# Altium footprint library rus.PcbLib: 72 footprints (part 2 of 5)
Each footprint in its own frame and in the unit in brackets; x right, y up, seen from the top. Pads: shape width x height; smd on the part's side, far side on the other; paste and mask are expansions set on the pad; w line width, h text height; cw(c..) or ccw(c..) is an arc to the next point about the centre after c.
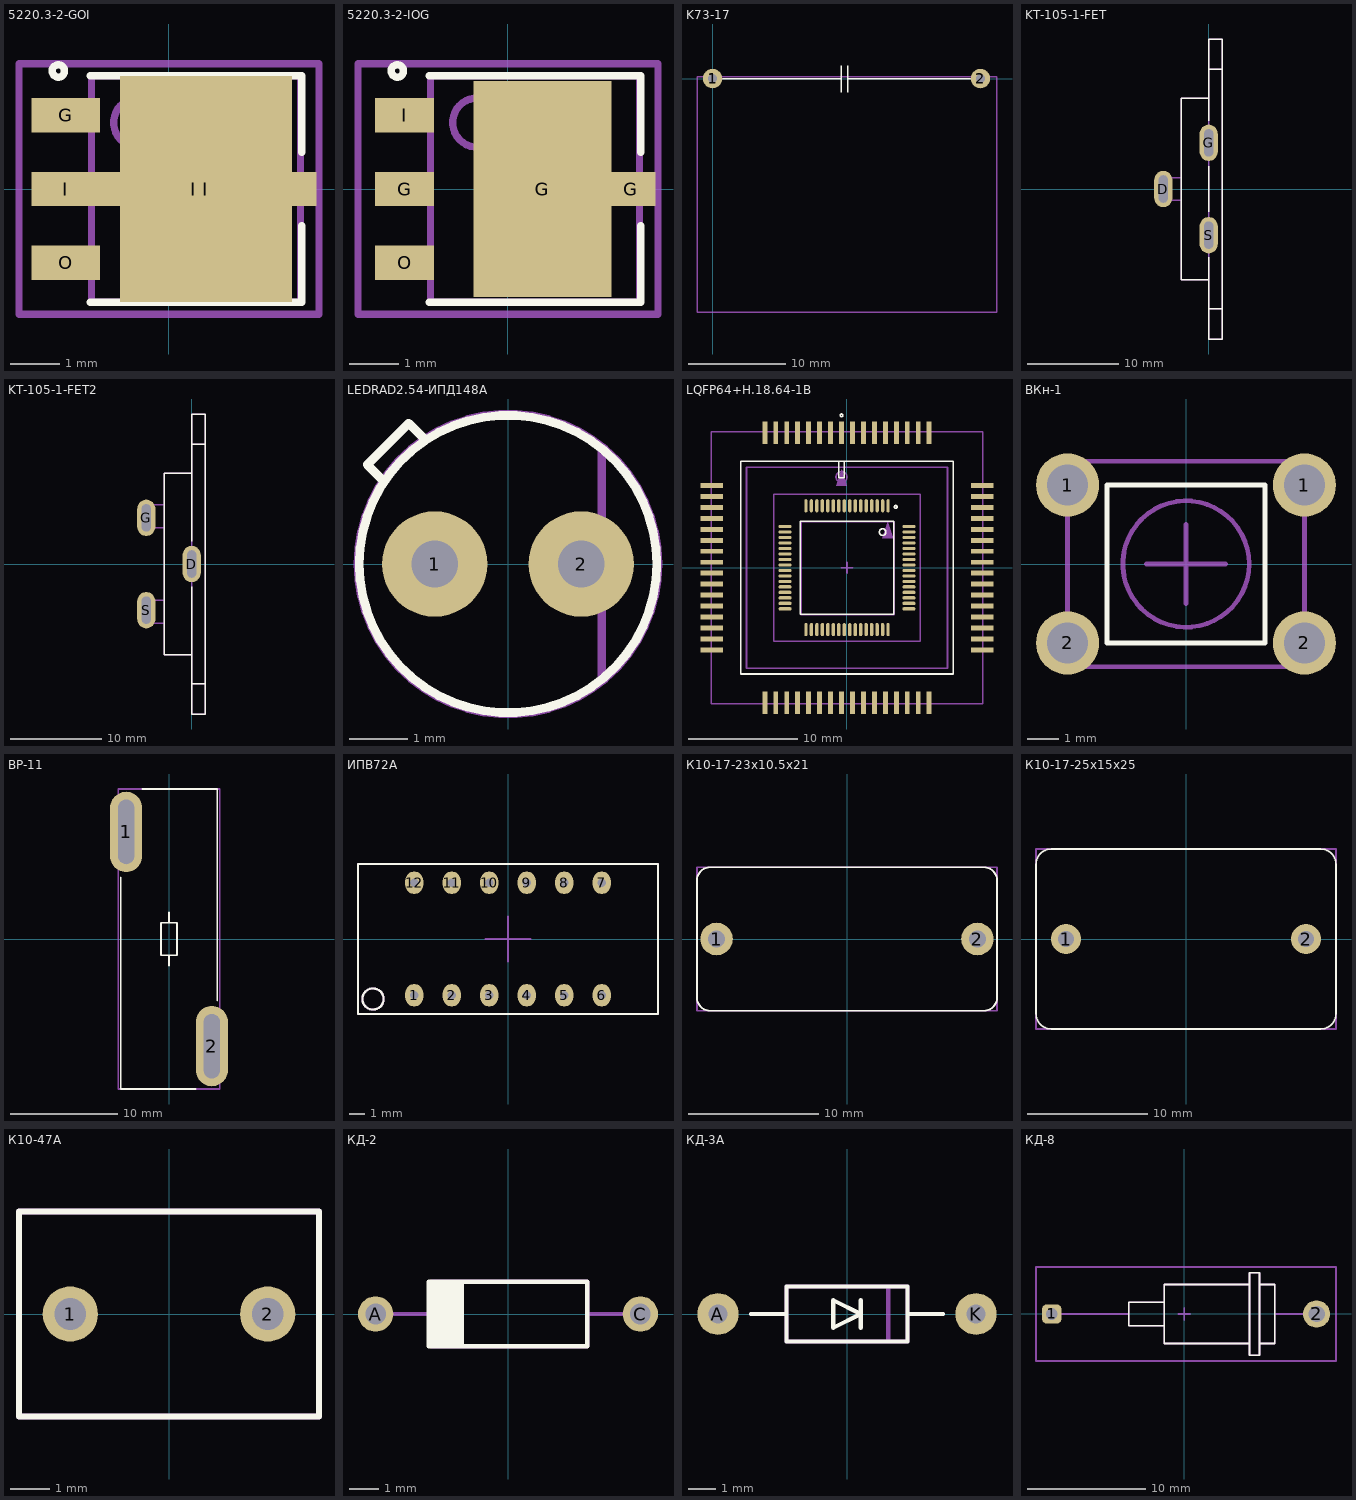
[diagram p1: the footprints below, top view; thin cyan lines are the x and y axes]

## 5220.3-2-GOI [mm] "SOT89, 3-Leads, Body 4,60x4,25mm, Pitch 1,50mm, Lead Span 4,8mm, IPC Medium Density"
height 1.6
pads (5):
  rect 1.4x0.7 smd: G(-2.1,1.5) I(-2.1,0) O(-2.1,-1.5)
  rect 5x0.7 smd: I(0.5,0)
  rect 3.5x4.6 smd: I(0.75,0)
Top Overlay:
  circle w0.15: c-2.25,2.4 r0.125
  lines w0.15: -1.6,-2.3 2.7,-2.3 2.7,-0.75 ; -1.6,2.3 2.7,2.3 2.7,0.75
Mechanical 15:
  lines w0.15: 0.05,0 1.05,0 ; 0.55,-0.5 0.55,0.5 ; -3.05,-2.55 3.05,-2.55 3.05,2.55 -3.05,2.55 -3.05,-2.55
Mechanical 29:
  circle w0.15: c-0.625,1.35 r0.5
  lines w0.15: -1.575,-2.3 2.675,-2.3 2.675,2.3 -1.575,2.3 -1.575,-2.3
  text ".Designator" at -1.4,-0.5 h1
3D body "5220.3-2-IOG.step": height 1.6, standoff 0, extent -2.75,-2.3 2.85,2.3

## 5220.3-2-IOG [mm] "SOT89, 3-Leads, Body 4,60x4,25mm, Pitch 1,50mm, Lead Span 4,8mm, IPC Medium Density"
height 1.6
pads (5):
  rect 1.2x0.7 smd: G(-2.1,0) I(-2.1,1.5) O(-2.1,-1.5)
  rect 2.8x4.4 smd: G(0.7,0)
  rect 1x0.7 smd: G(2.5,0)
Top Overlay:
  circle w0.15: c-2.25,2.4 r0.125
  lines w0.15: -1.6,-2.3 2.7,-2.3 2.7,-0.75 ; -1.6,2.3 2.7,2.3 2.7,0.75
Mechanical 15:
  lines w0.15: 0.05,0 1.05,0 ; 0.55,-0.5 0.55,0.5 ; -3.05,-2.55 3.05,-2.55 3.05,2.55 -3.05,2.55 -3.05,-2.55
Mechanical 29:
  circle w0.15: c-0.625,1.35 r0.5
  lines w0.15: -1.575,-2.3 2.675,-2.3 2.675,2.3 -1.575,2.3 -1.575,-2.3
  text ".Designator" at -1.4,-0.4 h1
3D body "5220.3-2-IOG.step": height 1.6, standoff 0, extent -2.75,-2.3 2.85,2.3

## K73-17 [mm]
pads (2):
  round 2 hole 0.9: 1(0,0) 2(27.5,0)
Top Overlay:
  lines w0.15: 0,0 13.225,0 13.225,-0.037 ; 13.225,-1.4 13.225,1.325 ; 13.875,-1.4 13.875,1.325 ; 13.875,-0.037 13.875,0 27.5,0
Mechanical 29:
  lines w0.15: -1.6,-24 29.2,-24 29.2,0.2 -1.6,0.2 -1.6,-24
  text ".Designator" at 9.1,-12 h1
3D body "K73-17.STEP": height 14.51, standoff -2, extent -1.725,-24.05 29.275,0.35

## KT-105-1-FET [mm]
height 30
pads (3):
  oval 2x4 hole 1 slot 3 at 90 deg: D(-5,0) G(0,5.08) S(0,-5.08)
Top Overlay:
  lines w0.15: 0,-13.2 1.5,-13.2 ; 0,-10 -3,-10 -3,10 0,10 ; 0,-7.5 0,-16.5 1.5,-16.5 1.5,-7.5 1.5,7.5 1.5,11 1.5,16.5 1.35,16.5 0,16.5 0,7.5 ; 0,-2.5 0,2.5 ; 0,13.2 1.5,13.2
Mechanical 29:
  lines w0.15: -3,-1.25 -5,-1.25 -5,1.25 -3,1.25 ; 0,-13.2 1.5,-13.2 ; 0,-10 -3,-10 -3,10 0,10 ; 0,13.2 1.5,13.2 ; 0,-16.5 0,-7.5 0,16.5 1.35,16.5 1.5,16.5 1.5,11 1.5,7.5 1.5,-7.5 1.5,-16.5 0,-16.5
  text ".Designator" at -1.3,-4.2 h1
3D body "KT-105-1-flex.STEP": height 30.8, standoff -3.2, extent -5.3,-16.35 1.2,16.35

## KT-105-1-FET2 [mm]
height 30
pads (3):
  oval 2x4 hole 1 slot 3 at 90 deg: D(0,0) G(-5,5.08) S(-5,-5.08)
Top Overlay:
  lines w0.15: 0,-13.2 1.5,-13.2 ; 0,-10 -3,-10 -3,10 0,10 ; 0,-2.5 0,-16.5 1.5,-16.5 1.5,-7.5 1.5,7.5 1.5,11 1.5,16.5 1.35,16.5 0,16.5 0,2.5 ; 0,13.2 1.5,13.2
Mechanical 29:
  lines w0.15: -3,-6.5 -5,-6.5 -5,-4 -3,-4 ; -3,4 -5,4 -5,6.5 -3,6.5 ; 0,-13.2 1.5,-13.2 ; 0,-10 -3,-10 -3,10 0,10 ; 0,13.2 1.5,13.2 ; 0,-16.5 0,-7.5 0,16.5 1.35,16.5 1.5,16.5 1.5,11 1.5,7.5 1.5,-7.5 1.5,-16.5 0,-16.5
  text ".Designator" at -1.2,-3.6 h1
3D body "KT-105-1-flex2.STEP": height 30.8, standoff -3.2, extent -5.3,-16.35 1.2,16.35

## LEDRAD2.54-ИПД148А [mm]
height 10
pads (2):
  round 1.8 hole 0.8: 1(-1.252,0) 2(1.252,0)
Top Overlay:
  circle w0.15: c0,0 r2.54
  lines w0.15: -2.121,1.414 -2.404,1.697 -1.697,2.404 -1.414,2.121
Mechanical 29:
  circle w0.15: c0,0 r2.561
  lines w0.15: 1.6,-2 1.6,2
  text ".Designator" at -2.2,-0.4 h1
3D body "ИПД148Аподставка.STEP": height 4.5, standoff 0, extent -3,-3 3,3
3D body "ИПД148А.STEP": height 9.19, standoff -2.5, extent -2.92,-2.92 2.92,2.933

## LQFP64+Н.18.64-1В [mm] "CQFP, 64-Leads, Body 23,40x23,40mm, Pitch 1,00mm, IPC Medium Density"
height 3.5
pads (128):
  oval 0.3x1.2 smd: 1(3.75,5.65) 2(3.25,5.65) 3(2.75,5.65) 4(2.25,5.65) 5(1.75,5.65) 6(1.25,5.65) 7(0.75,5.65) 8(0.25,5.65) 9(-0.25,5.65) 10(-0.75,5.65) 11(-1.25,5.65) 12(-1.75,5.65) 13(-2.25,5.65) 14(-2.75,5.65) 15(-3.25,5.65) 16(-3.75,5.65) 33(-3.75,-5.65) 34(-3.25,-5.65) 35(-2.75,-5.65) 36(-2.25,-5.65) 37(-1.75,-5.65) 38(-1.25,-5.65) 39(-0.75,-5.65) 40(-0.25,-5.65) 41(0.25,-5.65) 42(0.75,-5.65) 43(1.25,-5.65) 44(1.75,-5.65) 45(2.25,-5.65) 46(2.75,-5.65) 47(3.25,-5.65) 48(3.75,-5.65)
  rect 0.45x2.05 smd: 1(7.5,12.325) 2(6.5,12.325) 3(5.5,12.325) 4(4.5,12.325) 5(3.5,12.325) 6(2.5,12.325) 7(1.5,12.325) 8(0.5,12.325) 9(-0.5,12.325) 10(-1.5,12.325) 11(-2.5,12.325) 12(-3.5,12.325) 13(-4.5,12.325) 14(-5.5,12.325) 15(-6.5,12.325) 16(-7.5,12.325) 33(-7.5,-12.325) 34(-6.5,-12.325) 35(-5.5,-12.325) 36(-4.5,-12.325) 37(-3.5,-12.325) 38(-2.5,-12.325) 39(-1.5,-12.325) 40(-0.5,-12.325) 41(0.5,-12.325) 42(1.5,-12.325) 43(2.5,-12.325) 44(3.5,-12.325) 45(4.5,-12.325) 46(5.5,-12.325) 47(6.5,-12.325) 48(7.5,-12.325)
  rect 2.05x0.45 smd: 17(-12.325,7.5) 18(-12.325,6.5) 19(-12.325,5.5) 20(-12.325,4.5) 21(-12.325,3.5) 22(-12.325,2.5) 23(-12.325,1.5) 24(-12.325,0.5) 25(-12.325,-0.5) 26(-12.325,-1.5) 27(-12.325,-2.5) 28(-12.325,-3.5) 29(-12.325,-4.5) 30(-12.325,-5.5) 31(-12.325,-6.5) 32(-12.325,-7.5) 49(12.325,-7.5) 50(12.325,-6.5) 51(12.325,-5.5) 52(12.325,-4.5) 53(12.325,-3.5) 54(12.325,-2.5) 55(12.325,-1.5) 56(12.325,-0.5) 57(12.325,0.5) 58(12.325,1.5) 59(12.325,2.5) 60(12.325,3.5) 61(12.325,4.5) 62(12.325,5.5) 63(12.325,6.5) 64(12.325,7.5)
  oval 1.2x0.3 smd: 17(-5.65,3.75) 18(-5.65,3.25) 19(-5.65,2.75) 20(-5.65,2.25) 21(-5.65,1.75) 22(-5.65,1.25) 23(-5.65,0.75) 24(-5.65,0.25) 25(-5.65,-0.25) 26(-5.65,-0.75) 27(-5.65,-1.25) 28(-5.65,-1.75) 29(-5.65,-2.25) 30(-5.65,-2.75) 31(-5.65,-3.25) 32(-5.65,-3.75) 49(5.65,-3.75) 50(5.65,-3.25) 51(5.65,-2.75) 52(5.65,-2.25) 53(5.65,-1.75) 54(5.65,-1.25) 55(5.65,-0.75) 56(5.65,-0.25) 57(5.65,0.25) 58(5.65,0.75) 59(5.65,1.25) 60(5.65,1.75) 61(5.65,2.25) 62(5.65,2.75) 63(5.65,3.25) 64(5.65,3.75)
Top Overlay:
  circle w0.15: c4.45,5.55 r0.125
  circle w0.15: c3.25,3.25 r0.3
  circle w0.15: c-0.5,13.9 r0.125
  lines w0.15: -0.75,9.7 -0.75,8.2 -0.25,8.2 -0.25,9.7 ; -9.7,-9.7 -9.7,9.7 9.7,9.7 9.7,-9.7 -9.7,-9.7 ; -4.25,-4.25 4.25,-4.25 4.25,4.25 -4.25,4.25 -4.25,-4.25
Mechanical 13:
  circle w0.15: c-0.5,8.275 r0.5
Mechanical 15:
  lines w0.15: -12.4,-12.4 -12.4,12.4 12.4,12.4 12.4,-12.4 -12.4,-12.4 ; -6.7,-6.7 6.7,-6.7 6.7,6.7 -6.7,6.7 -6.7,-6.7 ; -0.5,0 0.5,0 -0.5,0 ; 0,-0.5 0,0.5 0,-0.5
Mechanical 29:
  region: -0.5,9 0,7.5 -1,7.5
  region: 3.7,4.2 4.2,2.7 3.2,2.7
  lines w0.15: -9.175,-9.175 -9.175,9.175 9.175,9.175 9.175,-9.175 -9.175,-9.175 ; -4.2,-4.3 4.3,-4.3 4.3,4.2 -4.2,4.2 -4.2,-4.3
  text ".Designator" at -3.1,-0.6 h1
3D body "Н.18.64-1В.STEP": height 4.11, standoff 0, extent -13.15,-13.15 13.15,13.15
3D body: height 1.5, standoff 0, extent -6,-6 6,6

## ВКн-1 [mm]
height 7
pads (4):
  round 2 hole 1.3: 1(-3.75,2.5) 1(3.75,2.5) 2(-3.75,-2.5) 2(3.75,-2.5)
Top Overlay:
  lines w0.15: -2.5,-2.5 2.5,-2.5 2.5,2.5 -2.5,2.5 -2.5,-2.5
Mechanical 15:
  lines w0.15: -1.25,0 1.25,0 ; 0,-1.25 0,1.25
Mechanical 29:
  circle w0.15: c0,0 r2
  lines w0.15: -3.75,-3.25 3.75,-3.25 3.75,3.25 -3.75,3.25 -3.75,-3.25
  text ".Designator" at -2.9,3.5 h1
3D body "ВКн-1.STEP": height 5.7, standoff -2.5, extent -3.75,-3.25 3.75,3.25

## ВР-11 [mm]
height 28
pads (2):
  oval 3x7.5 hole 1.5 slot 6 at 90 deg unplated: 1(-4,10) 2(4,-10)
Top Overlay:
  lines w0.15: -4.5,5.75 -4.5,-14 2.5,-14 ; -2.5,14 4.5,14 4.5,-5.75 ; 0,-2.5 0,-1.5 ; 0,1.5 0,2.5 ; -0.75,-1.5 -0.75,1.5 0.75,1.5 0.75,-1.5 -0.75,-1.5
Mechanical 29:
  lines w0.15: -4.75,-14 4.75,-14 4.75,14 -4.75,14 -4.75,-14
  text ".Designator" at -3.2,-0.3 h1
3D body "ВР-11.STEP": height 28.5, standoff -4.5, extent -4.65,-14 4.65,14

## ИПВ72А [mm]
height 8
pads (12):
  oval 1.2x1.5 hole 0.6: 1(-6.25,-3.75) 2(-3.75,-3.75) 3(-1.25,-3.75) 4(1.25,-3.75) 5(3.75,-3.75) 6(6.25,-3.75) 7(6.25,3.75) 8(3.75,3.75) 9(1.25,3.75) 10(-1.25,3.75) 11(-3.75,3.75) 12(-6.25,3.75)
Top Overlay:
  circle w0.15: c-9,-4 r0.707
  lines w0.15: -10,-5 10,-5 10,5 -10,5 -10,-5
Mechanical 15:
  lines w0.15: -1.5,0 1.5,0 ; 0,-1.5 0,1.5
Mechanical 29:
  circle w0.15: c-9,-4 r0.707
  lines w0.15: -10,-5 10,-5 10,5 -10,5 -10,-5
  text ".Designator" at -3.8,-0.3 h1
3D body "ИПВ72А.STEP": height 6, standoff -4.5, extent -10,-5 10,5

## К10-17-23х10.5х21 [mm]
height 23
pads (2):
  round 2.5 hole 1.3 unplated: 1(-10,0) 2(10,0)
Top Overlay:
  lines w0.15: -11.5,-4.5 ccw(c-10.5,-4.5) -10.5,-5.5 10.5,-5.5 ccw(c10.5,-4.5) 11.5,-4.5 11.5,4.5 ccw(c10.5,4.5) 10.5,5.5 -10.5,5.5 ccw(c-10.5,4.5) -11.5,4.5 -11.5,-4.5
Mechanical 29:
  lines w0.15: -11.5,-5.5 11.5,-5.5 11.5,5.5 -11.5,5.5 -11.5,-5.5
  text ".Designator" at -2.7,-0.4 h1
3D body: height 23, standoff 2, extent -11.499,-5.499 11.499,5.499

## К10-17-25х15х25 [mm]
height 27
pads (2):
  round 2.5 hole 1.3 unplated: 1(-10,0) 2(10,0)
Top Overlay:
  lines w0.15: -12.5,-6.23 ccw(c-11.23,-6.23) -11.23,-7.5 0,-7.5 11.23,-7.5 ccw(c11.23,-6.23) 12.5,-6.23 12.5,0 12.5,6.23 ccw(c11.23,6.23) 11.23,7.5 0,7.5 -11.23,7.5 ccw(c-11.23,6.23) -12.5,6.23 -12.5,0 -12.5,-6.23
Mechanical 29:
  lines w0.15: -12.5,-7.5 12.5,-7.5 12.5,7.5 -12.5,7.5 -12.5,-7.5
  text ".Designator" at -3.1,-0.3 h1
3D body: height 27, standoff 2, extent -12.499,-7.499 12.499,7.499

## К10-47А [mm] "7.5x5.3x5"
height 21
pads (2):
  round 1.4 hole 0.8: 1(-2.5,0) 2(2.5,0)
Top Overlay:
  lines w0.15: -3.8,-2.6 -3.8,2.6 3.8,2.6 3.8,-2.6 -3.8,-2.6
Mechanical 1:
  lines w0.15: -3.8,-2.6 -3.8,2.6 3.8,2.6 3.8,-2.6 -3.8,-2.6
Mechanical 29:
  lines w0.15: -3.8,-2.6 3.8,-2.6 3.8,2.6 -3.8,2.6 -3.8,-2.6
  text ".Designator" at -2.7,-0.3 h1
3D body "CPLP5mm5v4.STEP": height 7, standoff -2.6, extent -3.6,-2.7 3.6,2.7

## КД-2 [mm]
pads (2):
  round 1.2 hole 0.7: A(-4.5,0) C(4.5,0)
Top Overlay:
  rectangle: -2.7,-1.1 -1.5,1.1
  lines w0.15: -2.7,-1.1 2.7,-1.1 2.7,1.1 -2.6,1.1 -2.7,1.1 -2.7,-1.1
Mechanical 29:
  rectangle: -2.6,-1.1 -1.9,1.1
  lines w0.15: -4.5,0 -2.6,0 ; 2.7,0 4.5,0 ; -2.6,-1.1 2.7,-1.1 2.7,1.1 -2.6,1.1 -2.6,-1.1
  text ".Designator" at -1.5,-0.4 h1
3D body: height 2.39, standoff 0.2, extent -2.291,-1.098 2.209,1.098

## КД-3А [mm] "КД-3А диод/стабилистрон"
height 2
pads (2):
  oval 1.5x1.52 hole 0.7: A(-4.7,0) K(4.7,0)
Top Overlay:
  lines w0.15: -3.5,0 -2.2,0 ; 0.5,-0.5 0.5,0.5 ; 2.2,0 3.5,0 ; -2.2,-1 2.2,-1 2.2,1 -2.2,1 -2.2,-1 ; -0.5,-0.5 -0.5,0.5 0.5,0 -0.5,-0.5
Mechanical 29:
  lines w0.15: -3.5,0 -2.2,0 ; 1.5,-1 1.5,1 ; 2.2,0 3.5,0 ; -2.2,-1 2.2,-1 2.2,1 -2.2,1 -2.2,-1
  text ".Designator" at -1.9,-0.5 h1

## КД-8 [mm] "Pitch 22.5mm"
height 7
pads (2):
  rrect50% 1.65x1.65 hole 1: 1(-11.25,0)
  round 2.3 hole 1.4: 2(11.25,0)
Top Overlay:
  lines w0.15: -1.7,-1 -4.7,-1 -4.7,1 -1.7,1 ; 5.55,-2.5 -1.7,-2.5 -1.7,2.5 5.55,2.5 ; 6.4,-2.5 7.7,-2.5 7.7,2.5 6.4,2.5 ; 5.55,-3.5 6.4,-3.5 6.4,3.5 5.55,3.5 5.55,-3.5
Mechanical 15:
  lines w0.15: -0.5,0 0.5,0 ; 0,-0.5 0,0.5 ; -12.59,-4 -12.59,4 12.9,4 12.9,-4 -12.59,-4
Mechanical 29:
  lines w0.15: -11.2,0 -4.7,0 ; -1.7,-1 -4.7,-1 -4.7,1 -1.7,1 ; 5.55,-2.5 -1.7,-2.5 -1.7,2.5 5.55,2.5 ; 6.4,-2.5 7.7,-2.5 7.7,2.5 6.4,2.5 ; 7.7,0 11.2,0 ; 5.55,-3.5 5.55,3.5 6.4,3.5 6.4,-3.5 5.55,-3.5
  text ".Designator" at -1.1,-0.5 h1
3D body "КД-8.STEP": height 7, standoff -3, extent -11.6,-3.493 11.8,3.493